# Altium schematic symbol library Universal capacitor SMD.SchLib: 1 symbol
Pins are listed as number, name and electrical type; pins without a type are passive.

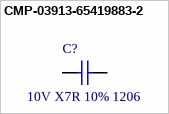
[diagram p0: symbol CMP-03913-65419883-2]

## CMP-03913-65419883-2
designator C?, comment 10V X7R 10% 1206
Cap Ceramic uF 10V X7R 10% Pad SMD 1206; Case/Package: 1206; Value: *; Manufacturer: *; Manufacturer Product Number: *
footprint WCAP-CSGP_1206_L3.2W1.6H0.8 (Ceramic Capacitors, body 3.2x1.6mm)
pins: 1, 2